# Altium footprint library SamacSys.PcbLib: 1008 footprints (part 58 of 63)
Each footprint in its own frame and in the unit in brackets; x right, y up, seen from the top. Pads: shape width x height; smd on the part's side, far side on the other; paste and mask are expansions set on the pad; w line width, h text height; cw(c..) or ccw(c..) is an arc to the next point about the centre after c.
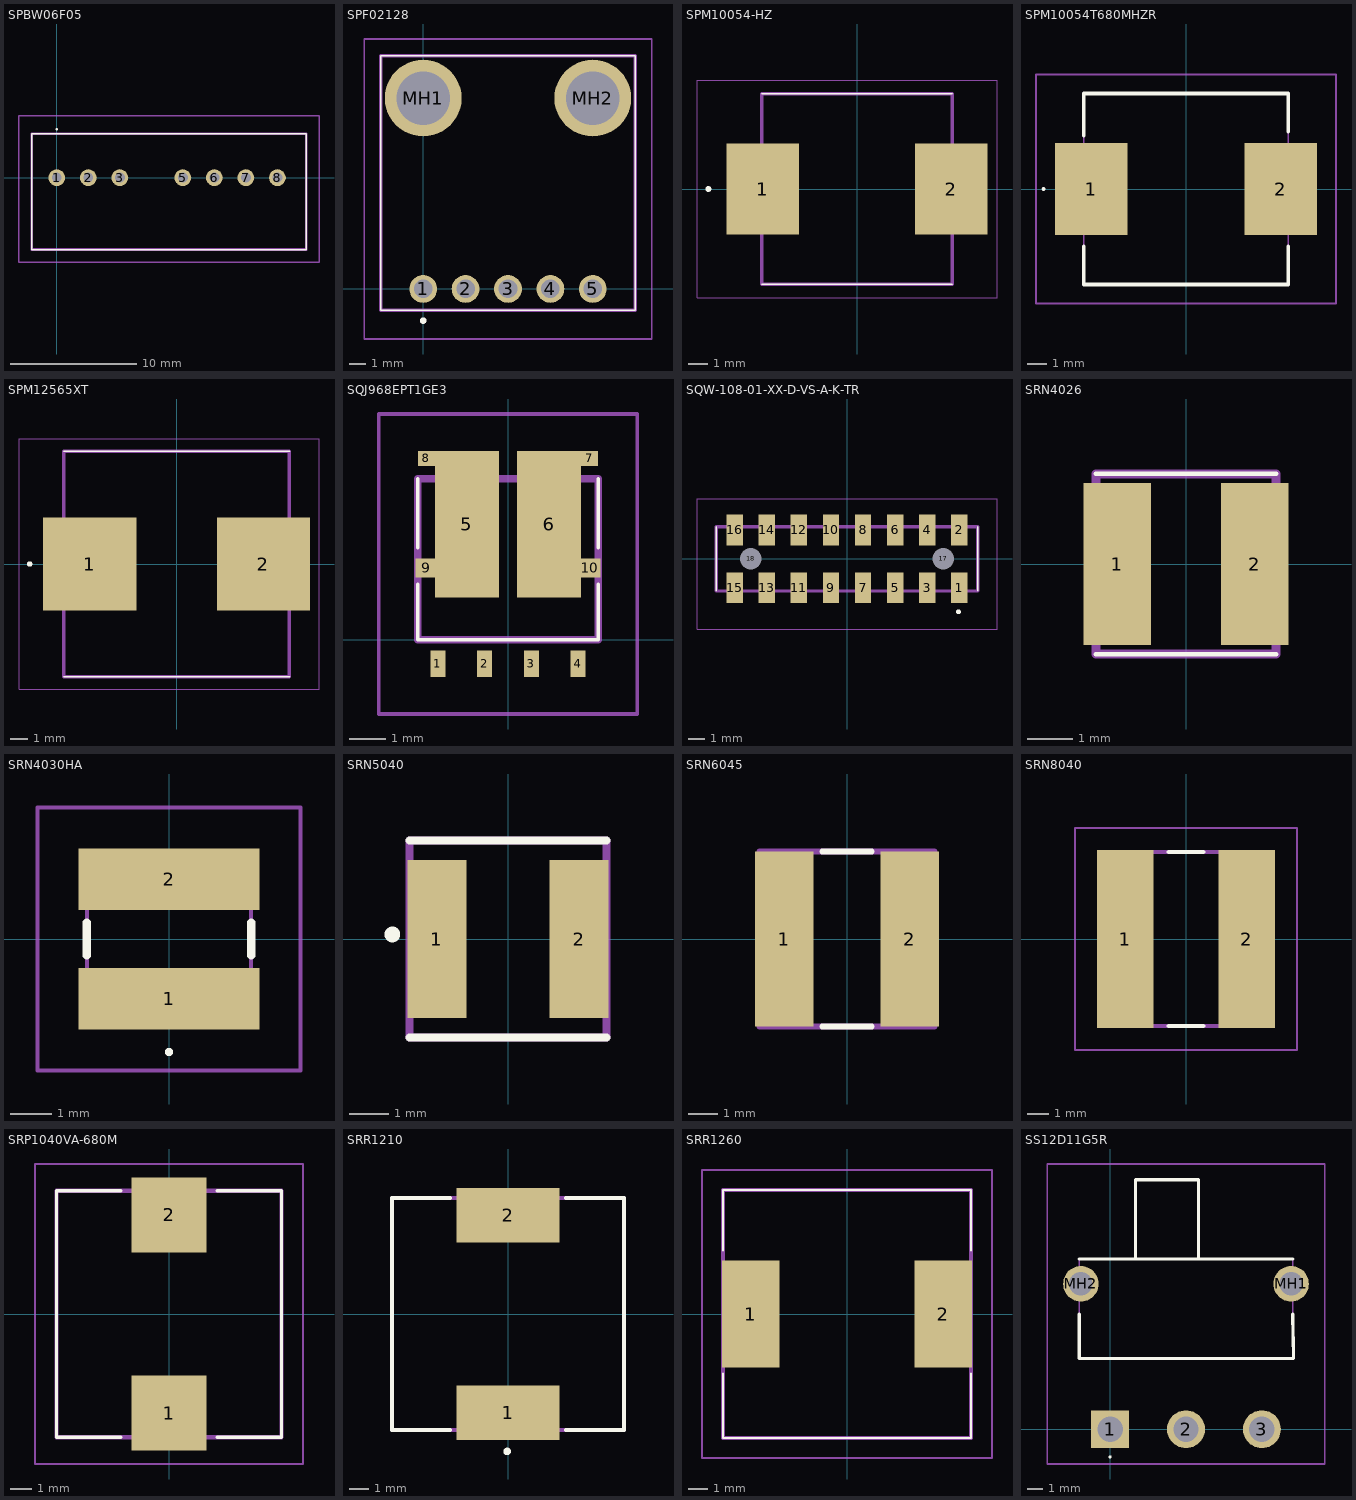
[diagram p57: the footprints below, top view; thin cyan lines are the x and y axes]

## SPBW06F05 [mm]
pads (7):
  round 1.337 hole 0.78: 1(0,0) 2(2.5,0) 3(5,0) 5(10,0) 6(12.5,0) 7(15,0) 8(17.5,0)
Top Overlay:
  lines w0.1: -2,-5.7 -2,3.5 19.8,3.5 19.8,-5.7 -2,-5.7 ; 0,3.8 ccw(c0,3.85) 0,3.9 ccw(c0,3.85) 0,3.8
Assembly:
  lines w0.2: -2,-5.7 -2,3.5 19.8,3.5 19.8,-5.7 -2,-5.7
Countryard:
  lines w0.1: -3,-6.7 -3,4.9 20.8,4.9 20.8,-6.7 -3,-6.7
3D body "SPBW03F-05.stp": height 11.7, standoff -5, extent -2,-5.7 19.8,3.5

## SPF02128 [mm]
pads (7):
  round 1.665 hole 1.11: 1(0,0) 2(2.54,0) 3(5.08,0) 4(7.62,0) 5(10.16,0)
  round 4.6 hole 3.2: MH1(0,11.43) MH2(10.16,11.43)
Top Overlay:
  lines w0.1: -2.54,-1.27 -2.54,13.97 12.7,13.97 12.7,-1.27 -2.54,-1.27
  lines w0.2: -0.1,-1.9 ccw(c0,-1.9) 0.1,-1.9 ccw(c0,-1.9) -0.1,-1.9
Assembly:
  lines w0.2: -2.54,-1.27 -2.54,13.97 12.7,13.97 12.7,-1.27 -2.54,-1.27
Countryard:
  lines w0.1: -3.54,-3 -3.54,14.97 13.7,14.97 13.7,-3 -3.54,-3
3D body "SPF-02128.stp": height 5.1, standoff -5, extent -2.54,-1.27 12.7,13.97

## SPM10054-HZ [mm]
pads (2):
  rect 3.8x4.8 smd: 1(-4.95,0) 2(4.95,0)
Top Overlay:
  circle w0.2: c-7.8,0 r0.05
  lines w0.1: -5,-5 5,-5 ; -5,5 5,5
Assembly:
  lines w0.2: -5,-5 5,-5 5,5 -5,5 -5,-5
Countryard:
  lines w0.05: -8.4,-5.7 7.35,-5.7 7.35,5.7 -8.4,5.7 -8.4,-5.7
3D body "SPM10054T-680M-HZ.stp": height 5.4, standoff 0, extent -5.35,-5 5.35,5

## SPM10054T680MHZR [mm]
pads (2):
  rect 3.8x4.8 smd: 1(-4.95,0) 2(4.95,0)
Top Overlay:
  lines w0.1: -7.5,0 ccw(c-7.45,0) -7.4,0 ccw(c-7.45,0) -7.5,0
  lines w0.2: -5.35,-3 -5.35,-5 5.35,-5 5.35,-3 ; -5.35,2.8 -5.35,3 -5.35,5 5.35,5 5.35,3
Assembly:
  lines w0.1: -5.35,-5 -5.35,5 5.35,5 5.35,-5 -5.35,-5
Countryard:
  lines w0.1: -7.85,-6 -7.85,6 7.85,6 7.85,-6 -7.85,-6
3D body "SPM10054T-680M-HZR.stp": height 5.4, standoff 0, extent -5.35,-5 5.35,5

## SPM12565XT [mm]
pads (2):
  rect 5.2x5.2 smd: 1(-4.85,0) 2(4.85,0)
Top Overlay:
  circle w0.2: c-8.2,0 r0.05
  lines w0.1: -6.3,-6.3 6.3,-6.3 ; -6.3,6.3 6.3,6.3
Assembly:
  lines w0.2: -6.3,-6.3 -6.3,6.3 6.3,6.3 6.3,-6.3 -6.3,-6.3
Countryard:
  lines w0.05: -8.8,-7 -8.8,7 7.95,7 7.95,-7 -8.8,-7
3D body "SPM12565XT-1R0M.stp": height 6.5, standoff 0, extent -6.5,-6.3 6.5,6.3

## SQJ968EPT1GE3 [mm]
pads (10):
  rect 0.41x0.72 smd: 1(-1.905,-0.66) 2(-0.635,-0.66) 3(0.635,-0.66) 4(1.905,-0.66)
  rect 1.73x3.99 smd: 5(-1.115,3.135) 6(1.115,3.135)
  rect 0.47x0.41 smd: 7(2.215,4.926) 8(-2.215,4.926)
  rect 0.585x0.51 smd: 9(-2.215,1.95) 10(2.215,1.95)
Top Overlay:
  lines w0.1: -2.45,1.5 -2.45,0 2.45,0 2.45,1.5 ; -2.45,2.5 -2.45,4.37 ; 2.45,2.5 2.45,4.37
Assembly:
  lines w0.2: -2.45,0 2.45,0 2.45,4.37 -2.45,4.37 -2.45,0
Countryard:
  lines w0.1: -3.508,-2.02 3.508,-2.02 3.508,6.131 -3.508,6.131 -3.508,-2.02

## SQW-108-01-XX-D-VS-A-K-TR [mm]
pads (18):
  rect 1.016x1.91 smd: 1(7,-1.8) 2(7,1.8) 3(5,-1.8) 4(5,1.8) 5(3,-1.8) 6(3,1.8) 7(1,-1.8) 8(1,1.8) 9(-1,-1.8) 10(-1,1.8) 11(-3,-1.8) 12(-3,1.8) 13(-5,-1.8) 14(-5,1.8) 15(-7,-1.8) 16(-7,1.8)
  round 0.675 hole 1.35 unplated: 17(6,0) 18(-6,0)
Top Overlay:
  circle w0.2: c6.95,-3.3 r0.05
  lines w0.1: -8.149,-2 -8.149,2 ; 8.149,-2 8.149,2
Assembly:
  lines w0.2: -8.149,-2 -8.149,2 8.149,2 8.149,-2 -8.149,-2
Countryard:
  lines w0.05: -9.349,-4.4 -9.349,3.755 9.349,3.755 9.349,-4.4 -9.349,-4.4
3D body "SQW-108-01-F-D-VS-A-K-TR.stp": height 7.85, standoff -1.7, extent -8.149,-2.653 8.149,2.653

## SRN4026 [mm]
pads (2):
  rect 1.5x3.6 smd: 1(-1.525,0) 2(1.525,0)
Top Overlay:
  lines w0.1: -2,-2 2,-2 ; -2,2 2,2
Assembly:
  lines w0.2: -2,-2 2,-2 2,2 -2,2 -2,-2

## SRN4030HA [mm]
height 3
pads (2):
  rect 4.4x1.5 smd: 1(0,-1.45) 2(0,1.45)
Top Overlay:
  lines w0.1: 0,-2.8 ccw(c0,-2.75) 0,-2.7 ccw(c0,-2.75) 0,-2.8
  lines w0.2: -2,-0.4 -2,0.4 ; 2,-0.4 2,0.4
Assembly:
  lines w0.1: -2,-2 2,-2 2,2 -2,2 -2,-2
Countryard:
  lines w0.1: -3.2,-3.2 3.2,-3.2 3.2,3.2 -3.2,3.2 -3.2,-3.2
3D body "SRN4030HA-100M.stp": height 2.81, standoff 0, extent -1.75,-2.001 1.75,2.001

## SRN5040 [mm]
pads (2):
  rect 1.5x4 smd: 1(-1.8,0) 2(1.8,0)
Top Overlay:
  circle w0.2: c-2.929,0.115 r0.099
  lines w0.2: -2.5,-2.5 2.5,-2.5 ; -2.5,2.5 2.5,2.5
Assembly:
  lines w0.2: -2.5,-2.5 -2.5,2.5 2.5,2.5 2.5,-2.5 -2.5,-2.5
3D body "SRN5040-100M.stp": height 3.44, standoff 0, extent -2.494,-2.81 2.508,2.21

## SRN6045 [mm] "W6.00mm x H4.50mm"
pads (2):
  rect 2.01x6 smd: 1(-2.15,0) 2(2.15,0)
Top Overlay:
  lines w0.2: -0.85,-3 0.85,-3 ; -0.85,3 0.85,3
Assembly:
  lines w0.2: -3,-3 -3,3 3,3 3,-3 -3,-3
3D body "SRN6045-100M.stp": height 4.5, standoff 0, extent -3,-3 3,3

## SRN8040 [mm]
pads (2):
  rect 2.6x8.2 smd: 1(-2.8,0) 2(2.8,0)
Top Overlay:
  lines w0.2: -0.8,-4 0.8,-4 ; -0.8,4 0.8,4
Assembly:
  lines w0.2: -4,-4 -4,4 4,4 4,-4 -4,-4
Countryard:
  lines w0.1: -5.1,-5.1 -5.1,5.1 5.1,5.1 5.1,-5.1 -5.1,-5.1
3D body "SRN8040-220M.stp": height 3.95, standoff 0, extent -3.95,-4.075 3.95,4.075

## SRP1040VA-680M [mm]
height 4
pads (2):
  rect 3.5x3.5 smd: 1(0,-4.625) 2(0,4.625)
Top Overlay:
  lines w0.15: -2.25,-5.75 -5.25,-5.75 -5.25,5.75 -2.25,5.75 ; 2.25,-5.75 5.25,-5.75 5.25,5.75 2.25,5.75
Assembly:
  lines w0.2: -5.25,-5.75 -5.25,5.75 5.25,5.75 5.25,-5.75 -5.25,-5.75
Countryard:
  lines w0.1: -6.25,-7 -6.25,7 6.25,7 6.25,-7 -6.25,-7
3D body "SRP1040VA-680M.stp": height 3.8, standoff -0.2, extent -5,-5.5 5,5.5

## SRR1210 [mm]
pads (2):
  rect 5.3x2.8 smd: 1(0,-5.1) 2(0,5.1)
Top Overlay:
  circle w0.2: c-0.044,-7.101 r0.093
  lines w0.2: -3,-6 -6,-6 -6,6 -3,6 ; 3,-6 6,-6 6,6 3,6
Assembly:
  lines w0.2: -6,-6 -6,6 6,6 6,-6 -6,-6
3D body "SRR1210-680M.stp": height 10, standoff 0, extent -6,-6.35 6,5.65

## SRR1260 [mm]
height 6
pads (2):
  rect 2.9x5.4 smd: 1(-4.85,0) 2(4.85,0)
Top Overlay:
  lines w0.1: -6.25,-3 -6.25,-6.25 6.25,-6.25 6.25,-3 ; -6.25,3.2 -6.25,6.25 6.25,6.25 6.25,3.2
Assembly:
  lines w0.2: -6.25,-6.25 -6.25,6.25 6.25,6.25 6.25,-6.25 -6.25,-6.25
Countryard:
  lines w0.1: -7.3,-7.25 -7.3,7.25 7.3,7.25 7.3,-7.25 -7.3,-7.25
3D body "SRR1260-120M.stp": height 6, standoff 0, extent -6.25,-6.25 6.25,6.25

## SS12D11G5R [mm]
pads (5):
  rect 2.4x2.4 hole 1.6: 1(0,0)
  round 2.4 hole 1.6: 2(4.8,0) 3(9.6,0)
  round 2.25 hole 1.5: MH1(11.45,9.2) MH2(-1.85,9.2)
Top Overlay:
  lines w0.1: 0,-1.8 cw(c0,-1.75) 0,-1.7 cw(c0,-1.75) 0,-1.8
  lines w0.2: -1.95,7.28 -1.95,4.48 11.6,4.48 11.55,7.28 ; -1.95,10.78 11.55,10.78 ; 1.6,10.78 1.6,15.78 5.6,15.78 5.6,10.78
Assembly:
  lines w0.1: 1.6,10.78 1.6,15.78 5.6,15.78 5.6,10.78 ; -1.95,4.48 -1.95,10.78 11.55,10.78 11.55,4.48 -1.95,4.48
Countryard:
  lines w0.1: -3.975,-2.2 -3.975,16.78 13.575,16.78 13.575,-2.2 -3.975,-2.2
3D body "SS-12D11G5R.stp": height 6.93, standoff -2.86, extent -1.953,-0.663 11.546,15.787